# Altium footprint library cp2102n-a01-gqfn24.PcbLib: 3 footprints
Each footprint in its own frame and in the unit in brackets; x right, y up, seen from the top. Pads: shape width x height; smd on the part's side, far side on the other; paste and mask are expansions set on the pad; w line width, h text height; cw(c..) or ccw(c..) is an arc to the next point about the centre after c.
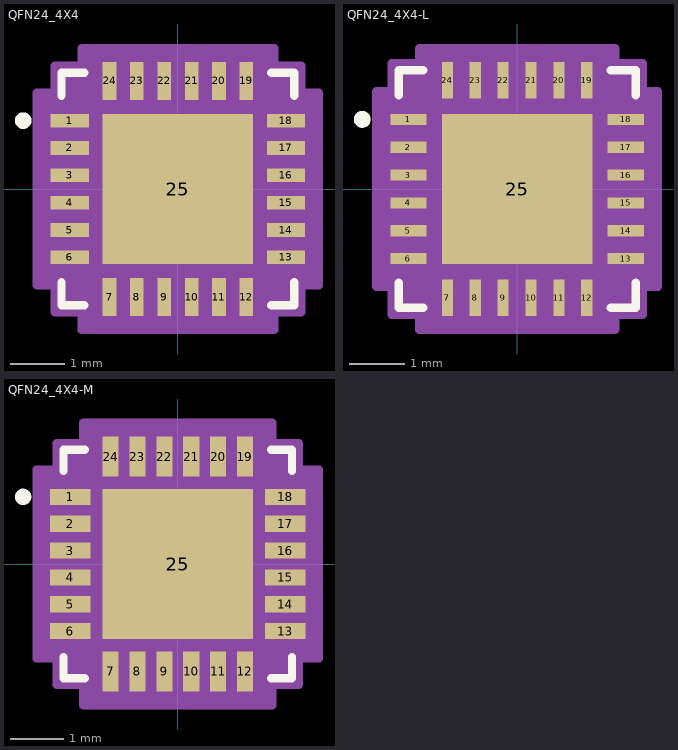
[diagram p0: the footprints below, top view; thin cyan lines are the x and y axes]

## QFN24_4X4 [mm]
pads (25):
  rect 0.7x0.25 smd paste+0 mask+0: 1(-1.975,1.25) 2(-1.975,0.75) 3(-1.975,0.25) 4(-1.975,-0.25) 5(-1.975,-0.75) 6(-1.975,-1.25) 13(1.975,-1.25) 14(1.975,-0.75) 15(1.975,-0.25) 16(1.975,0.25) 17(1.975,0.75) 18(1.975,1.25)
  rect 0.25x0.7 smd paste+0 mask+0: 7(-1.25,-1.975) 8(-0.75,-1.975) 9(-0.25,-1.975) 10(0.25,-1.975) 11(0.75,-1.975) 12(1.25,-1.975) 19(1.25,1.975) 20(0.75,1.975) 21(0.25,1.975) 22(-0.25,1.975) 23(-0.75,1.975) 24(-1.25,1.975)
  rect 2.75x2.75 smd paste-1.362 mask+0: 25(0,0)
Top Overlay:
  circle w0.152: c-2.829,1.25 r0.076
  lines w0.152: -2.127,-1.708 -2.127,-2.127 -1.708,-2.127 ; -2.127,1.708 -2.127,2.127 -1.708,2.127 ; 1.708,-2.127 2.127,-2.127 2.127,-1.708 ; 1.708,2.127 2.127,2.127 2.127,1.708
  text ".Designator" at -3.492,-0.635 h1.2
Top Paste:
  region: -0.1,1.275 -1.275,1.275 -1.275,0.1 -0.1,0.1
  region: -0.1,-0.1 -1.275,-0.1 -1.275,-1.275 -0.1,-1.275
  region: 1.275,1.275 0.1,1.275 0.1,0.1 1.275,0.1
  region: 1.275,-0.1 0.1,-0.1 0.1,-1.275 1.275,-1.275
Mechanical 13:
  circle w0.025: c-1.879,1.25 r0.076
  lines w0.025: -2,0.73 -0.73,2 ; -2,-2 2,-2 2,2 -2,2 -2,-2
  text ".Designator" at -3.492,-0.635 h1.27
Mechanical 15:
  region: -1.758,-2.254 -2.254,-2.254 -2.254,-1.758 -2.579,-1.758 -2.579,1.758 -2.254,1.758 -2.254,2.254 -1.758,2.254 -1.758,2.579 1.758,2.579 1.758,2.254 2.254,2.254 2.254,1.758 2.579,1.758 2.579,-1.758 2.254,-1.758 2.254,-2.254 1.758,-2.254 1.758,-2.579 -1.758,-2.579
  lines w0.152: -2.579,-1.758 -2.254,-1.758 -2.254,-2.254 -1.758,-2.254 -1.758,-2.579 1.758,-2.579 1.758,-2.254 2.254,-2.254 2.254,-1.758 2.579,-1.758 2.579,1.758 2.254,1.758 2.254,2.254 1.758,2.254 1.758,2.579 -1.758,2.579 -1.758,2.254 -2.254,2.254 -2.254,1.758 -2.579,1.758 -2.579,-1.758
3D body "QFN24_4X4.step": height 0.8, standoff 0, extent -2,-2 2,2

## QFN24_4X4-L [mm]
pads (25):
  rect 0.65x0.2 smd paste+0 mask+0: 1(-1.95,1.25) 2(-1.95,0.75) 3(-1.95,0.25) 4(-1.95,-0.25) 5(-1.95,-0.75) 6(-1.95,-1.25) 13(1.95,-1.25) 14(1.95,-0.75) 15(1.95,-0.25) 16(1.95,0.25) 17(1.95,0.75) 18(1.95,1.25)
  rect 0.2x0.65 smd paste+0 mask+0: 7(-1.25,-1.95) 8(-0.75,-1.95) 9(-0.25,-1.95) 10(0.25,-1.95) 11(0.75,-1.95) 12(1.25,-1.95) 19(1.25,1.95) 20(0.75,1.95) 21(0.25,1.95) 22(-0.25,1.95) 23(-0.75,1.95) 24(-1.25,1.95)
  rect 2.7x2.7 smd paste-1.337 mask+0: 25(0,0)
Top Overlay:
  circle w0.152: c-2.779,1.25 r0.076
  lines w0.152: -2.127,-1.683 -2.127,-2.127 -1.683,-2.127 ; -2.127,1.683 -2.127,2.127 -1.683,2.127 ; 1.683,-2.127 2.127,-2.127 2.127,-1.683 ; 1.683,2.127 2.127,2.127 2.127,1.683
  text ".Designator" at -3.492,-0.635 h1.2
Top Paste:
  region: -0.1,1.25 -1.25,1.25 -1.25,0.1 -0.1,0.1
  region: -0.1,-0.1 -1.25,-0.1 -1.25,-1.25 -0.1,-1.25
  region: 1.25,1.25 0.1,1.25 0.1,0.1 1.25,0.1
  region: 1.25,-0.1 0.1,-0.1 0.1,-1.25 1.25,-1.25
Mechanical 13:
  circle w0.025: c-1.879,1.25 r0.076
  lines w0.025: -2,0.73 -0.73,2 ; -2,-2 2,-2 2,2 -2,2 -2,-2
  text ".Designator" at -3.492,-0.635 h1.27
Mechanical 15:
  region: -1.758,-2.254 -2.254,-2.254 -2.254,-1.758 -2.529,-1.758 -2.529,1.758 -2.254,1.758 -2.254,2.254 -1.758,2.254 -1.758,2.529 1.758,2.529 1.758,2.254 2.254,2.254 2.254,1.758 2.529,1.758 2.529,-1.758 2.254,-1.758 2.254,-2.254 1.758,-2.254 1.758,-2.529 -1.758,-2.529
  lines w0.152: -2.529,-1.758 -2.254,-1.758 -2.254,-2.254 -1.758,-2.254 -1.758,-2.529 1.758,-2.529 1.758,-2.254 2.254,-2.254 2.254,-1.758 2.529,-1.758 2.529,1.758 2.254,1.758 2.254,2.254 1.758,2.254 1.758,2.529 -1.758,2.529 -1.758,2.254 -2.254,2.254 -2.254,1.758 -2.529,1.758 -2.529,-1.758
3D body "QFN24_4X4.step": height 0.8, standoff 0, extent -2,-2 2,2

## QFN24_4X4-M [mm]
pads (25):
  rect 0.75x0.3 smd paste+0 mask+0: 1(-2,1.25) 2(-2,0.75) 3(-2,0.25) 4(-2,-0.25) 5(-2,-0.75) 6(-2,-1.25) 13(2,-1.25) 14(2,-0.75) 15(2,-0.25) 16(2,0.25) 17(2,0.75) 18(2,1.25)
  rect 0.3x0.75 smd paste+0 mask+0: 7(-1.25,-2) 8(-0.75,-2) 9(-0.25,-2) 10(0.25,-2) 11(0.75,-2) 12(1.25,-2) 19(1.25,2) 20(0.75,2) 21(0.25,2) 22(-0.25,2) 23(-0.75,2) 24(-1.25,2)
  rect 2.8x2.8 smd paste-1.387 mask+0: 25(0,0)
Top Overlay:
  circle w0.152: c-2.879,1.25 r0.076
  lines w0.152: -2.127,-1.733 -2.127,-2.127 -1.733,-2.127 ; -2.127,1.733 -2.127,2.127 -1.733,2.127 ; 1.733,-2.127 2.127,-2.127 2.127,-1.733 ; 1.733,2.127 2.127,2.127 2.127,1.733
  text ".Designator" at -3.492,-0.635 h1.2
Top Paste:
  region: -0.1,1.3 -1.3,1.3 -1.3,0.1 -0.1,0.1
  region: -0.1,-0.1 -1.3,-0.1 -1.3,-1.3 -0.1,-1.3
  region: 1.3,1.3 0.1,1.3 0.1,0.1 1.3,0.1
  region: 1.3,-0.1 0.1,-0.1 0.1,-1.3 1.3,-1.3
Mechanical 13:
  circle w0.025: c-1.879,1.25 r0.076
  lines w0.025: -2,0.73 -0.73,2 ; -2,-2 2,-2 2,2 -2,2 -2,-2
  text ".Designator" at -3.492,-0.635 h1.27
Mechanical 15:
  region: -1.758,-2.254 -2.254,-2.254 -2.254,-1.758 -2.629,-1.758 -2.629,1.758 -2.254,1.758 -2.254,2.254 -1.758,2.254 -1.758,2.629 1.758,2.629 1.758,2.254 2.254,2.254 2.254,1.758 2.629,1.758 2.629,-1.758 2.254,-1.758 2.254,-2.254 1.758,-2.254 1.758,-2.629 -1.758,-2.629
  lines w0.152: -2.629,-1.758 -2.254,-1.758 -2.254,-2.254 -1.758,-2.254 -1.758,-2.629 1.758,-2.629 1.758,-2.254 2.254,-2.254 2.254,-1.758 2.629,-1.758 2.629,1.758 2.254,1.758 2.254,2.254 1.758,2.254 1.758,2.629 -1.758,2.629 -1.758,2.254 -2.254,2.254 -2.254,1.758 -2.629,1.758 -2.629,-1.758
3D body "QFN24_4X4.step": height 0.8, standoff 0, extent -2,-2 2,2